# Altium footprint library VY2102M29Y5US6TV7.PcbLib: 1 footprints
Each footprint in its own frame and in the unit in brackets; x right, y up, seen from the top. Pads: shape width x height; smd on the part's side, far side on the other; paste and mask are expansions set on the pad; w line width, h text height; cw(c..) or ccw(c..) is an arc to the next point about the centre after c.
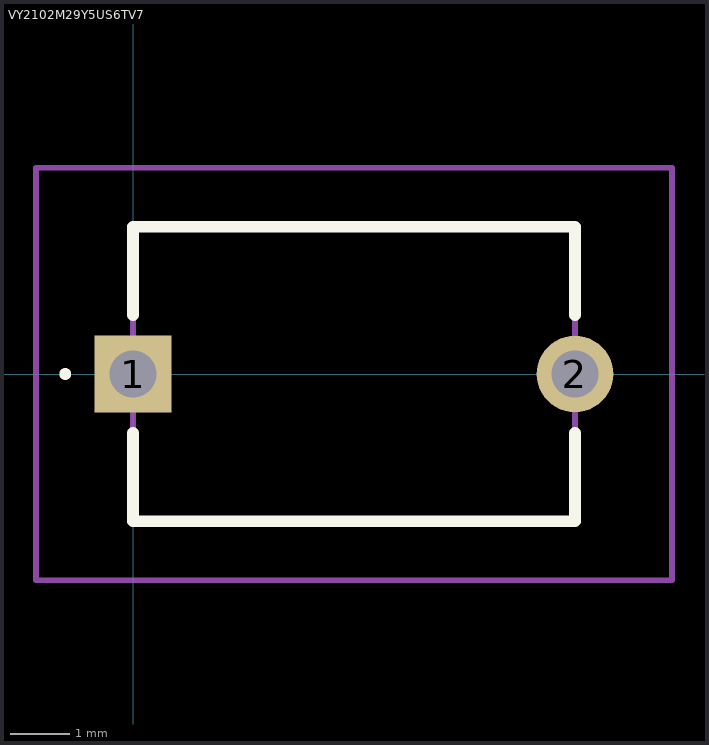
[diagram p0: the footprint, top view; thin cyan lines are the x and y axes]

## VY2102M29Y5US6TV7 [mm]
pads (2):
  rect 1.3x1.3 hole 0.8: 1(0,0)
  round 1.3 hole 0.8: 2(7.5,0)
Top Overlay:
  lines w0.1: -1.2,0 cw(c-1.15,0) -1.1,0 ; -1.2,0 -1.2,0 ; -1.2,0 ccw(c-1.15,0) -1.1,0 ; -1.1,0 -1.1,0
  lines w0.2: 0,-1 0,-2.5 7.5,-2.5 7.5,-1 ; 0,1 0,2.5 7.5,2.5 7.5,1
Mechanical 15:
  lines w0.1: 0,-2.5 7.5,-2.5 7.5,2.5 0,2.5 0,-2.5
Mechanical 20:
  lines w0.1: -1.65,-3.5 9.15,-3.5 9.15,3.5 -1.65,3.5 -1.65,-3.5